# Altium schematic symbol library Module.SchLib: 29 symbols
Pins are listed as number, name and electrical type; pins without a type are passive.

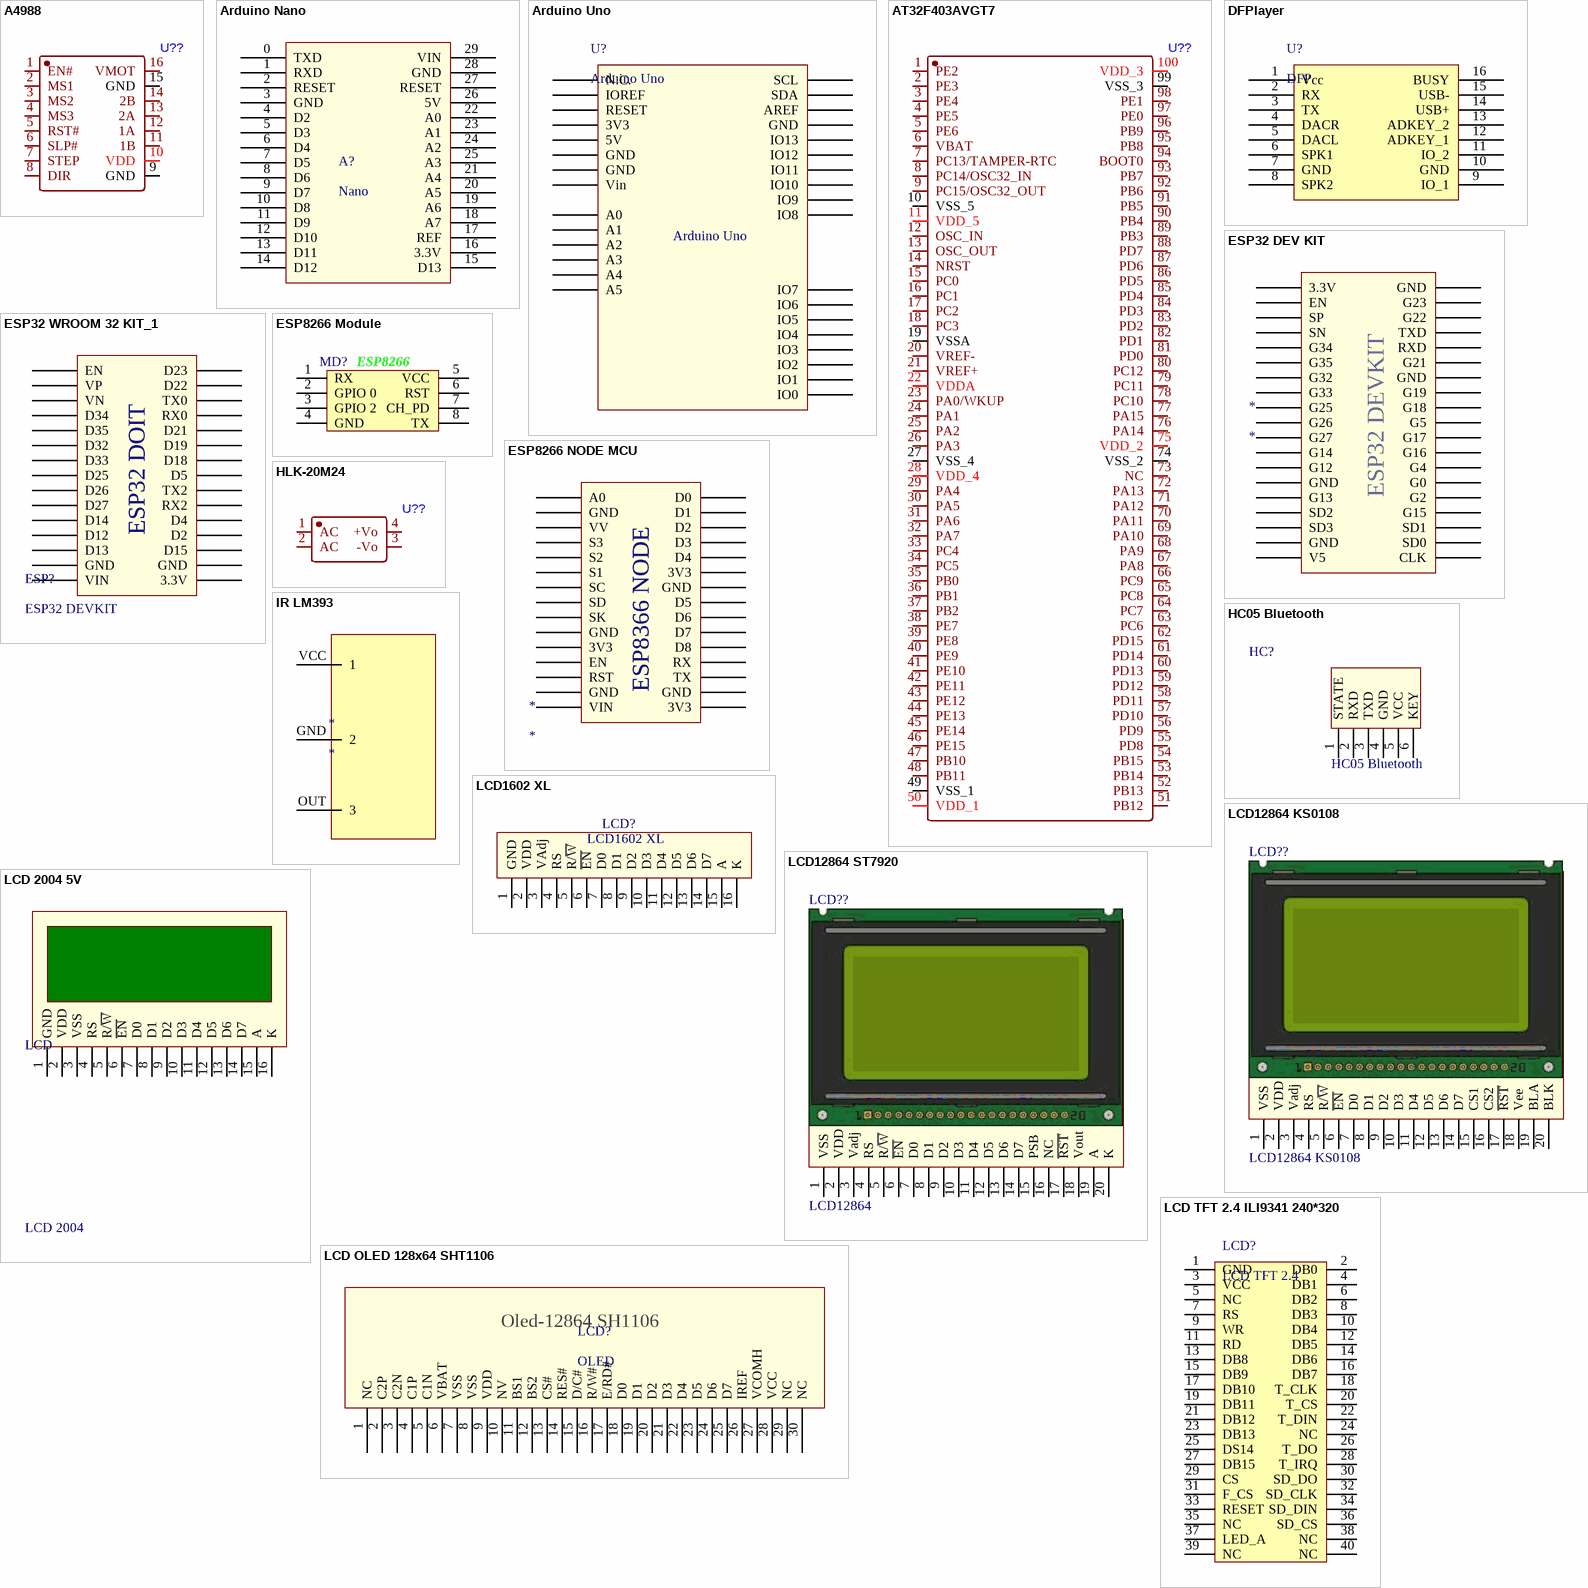
[diagram p0: symbols A4988 to LCD TFT 2.4 ILI9341 240*320]

## A4988
designator U??
Designer: Kata; Datasheet: https://www.alldatasheet.com/datasheet-pdf/pdf/455036/ALLEGRO/A4988.html; Link origin: https://grabcad.com/library/a4988-stepper-driver-with-pins-socketed-1, https://easyeda.com/editor#id=!b21f460f337c435d854d954092ca6a03|!253cdfaaa9784aa9ac4f75afb905f3ce; Link Vietnam: https://linhkienchatluong.vn/urlmodule-dieu-khien-dong-co/module-dieu-khien-dong-co-buoc-a4988_sp496_ct6114.aspx
footprint A4988
pins: 1 EN#, 2 MS1, 3 MS2, 4 MS3, 5 RST#, 6 SLP#, 7 STEP, 8 DIR, 9 GND, 10 VDD, 11 1B, 12 1A, 13 2A, 14 2B, 15 GND, 16 VMOT

## Arduino Nano
designator A?, comment Nano
footprint Arduino nano (arduino nano)
pins: 0 TXD, 1 RXD, 2 RESET, 3 GND, 4 D2, 5 D3, 6 D4, 7 D5, 8 D6, 9 D7, 10 D8, 11 D9, 12 D10, 13 D11, 14 D12, 15 D13, 16 3.3V, 17 REF, 18 A7, 19 A6, 20 A5, 21 A4, 22 A0, 23 A1, 24 A2, 25 A3, 26 5V, 27 RESET, 28 GND, 29 VIN

## Arduino Uno
designator U?
footprint Arduino Uno
footprint Arduino Uno Shield
pins: 0 IO0, 1 IO1, 2 IO2, 3 IO3, 3V3, 4 IO4, 5 IO5, 5V, 6 IO6, 7 IO7, 8 IO8, 9 IO9, 10 IO10, 11 IO11, 12 IO12, 13 IO13, A0, A1, A2, A3, A4, A5, AREF, GND1 GND, GND2 GND, GND3 GND, IOREF, NC N.C., RESET, SCL, SDA, Vin

## AT32F403AVGT7
designator U??
ARM Cortex-M4F 32 Bit 240MHz LQFP-100(14x14) Microcontrollers; Designer: Kata; Link origin: https://www.lcsc.com/product-detail/C528442.html?globalKeyword=C528442&s_z=n_q_C528442; Link origin2: https://componentsearchengine.com/part-view/STM32F103VGT6/STMicroelectronics; Link Datasheet: https://www.lcsc.com/datasheet/C528442.pdf
footprint AT32F403AVGT7
pins: 1 PE2, 2 PE3, 3 PE4, 4 PE5, 5 PE6, 6 VBAT, 7 PC13/TAMPER-RTC, 8 PC14/OSC32_IN, 9 PC15/OSC32_OUT, 10 VSS_5, 11 VDD_5, 12 OSC_IN, 13 OSC_OUT, 14 NRST, 15 PC0, 16 PC1, 17 PC2, 18 PC3, 19 VSSA, 20 VREF-, 21 VREF+, 22 VDDA, 23 PA0/WKUP, 24 PA1, 25 PA2, 26 PA3, 27 VSS_4, 28 VDD_4, 29 PA4, 30 PA5, 31 PA6, 32 PA7, 33 PC4, 34 PC5, 35 PB0, 36 PB1, 37 PB2, 38 PE7, 39 PE8, 40 PE9, 41 PE10, 42 PE11, 43 PE12, 44 PE13, 45 PE14, 46 PE15, 47 PB10, 48 PB11, 49 VSS_1, 50 VDD_1, 51 PB12, 52 PB13, 53 PB14, 54 PB15, 55 PD8, 56 PD9, 57 PD10, 58 PD11, 59 PD12, 60 PD13, 61 PD14, 62 PD15, 63 PC6, 64 PC7, 65 PC8, 66 PC9, 67 PA8, 68 PA9, 69 PA10, 70 PA11, 71 PA12, 72 PA13, 73 NC, 74 VSS_2, 75 VDD_2, 76 PA14, 77 PA15, 78 PC10, 79 PC11, 80 PC12, 81 PD0, 82 PD1, 83 PD2, 84 PD3, 85 PD4, 86 PD5, 87 PD6, 88 PD7, 89 PB3, 90 PB4, 91 PB5, 92 PB6, 93 PB7, 94 BOOT0, 95 PB8, 96 PB9, 97 PE0, 98 PE1, 99 VSS_3, 100 VDD_3

## DFPlayer
designator U?, comment DFP
DFPlayer
footprint DFPlayer
pins: 1 Vcc, 2 RX, 3 TX, 4 DACR, 5 DACL, 6 SPK1, 7 GND, 8 SPK2, 9 IO_1, 10 GND, 11 IO_2, 12 ADKEY_1, 13 ADKEY_2, 14 USB+, 15 USB-, 16 BUSY

## ESP32 DEV KIT
designator *
footprint ESP32 DEVKIT
pins: 1 3.3V, 2 EN, 3 SP, 4 SN, 5 G34, 6 G35, 7 G32, 8 G33, 9 G25, 10 G26, 11 G27, 12 G14, 13 G12, 14 GND, 15 G13, 16 SD2, 17 SD3, 18 GND, 19 V5, 20 CLK, 21 SD0, 22 SD1, 23 G15, 24 G2, 25 G0, 26 G4, 27 G16, 28 G17, 29 G5, 30 G18, 31 G19, 32 GND, 33 G21, 34 RXD, 35 TXD, 36 G22, 37 G23, 38 GND
text: ESP32 DEVKIT

## ESP32 WROOM 32 KIT_1
designator ESP?, comment ESP32 DEVKIT
Bảng Mạch Phát Triển WiFi Bluetooth Esp32; Designer: Kata; Datasheet: https://documentation.espressif.com/esp32-wroom-32_datasheet_en.pdf; Link Vietnam: https://shopee.vn/product/578443443/13742226706?d_id=3c2cb&uls_trackid=56tnvmar01un&utm_content=dRt74n3cjNaVUMxz7zAFb97c8p7
footprint ESP32 WROOM 32 KIT
pins: 1 EN, 2 VP, 3 VN, 4 D34, 5 D35, 6 D32, 7 D33, 8 D25, 9 D26, 10 D27, 11 D14, 12 D12, 13 D13, 14 GND, 15 VIN, 16 3.3V, 17 GND, 18 D15, 19 D2, 20 D4, 21 RX2, 22 TX2, 23 D5, 24 D18, 25 D19, 26 D21, 27 RX0, 28 TX0, 29 D22, 30 D23
text: ESP32 DOIT

## ESP8266 Module
designator MD?  (value not drawn)
footprint ESP2866 Module
pins: 1 RX, 2 GPIO 0, 3 GPIO 2, 4 GND, 5 VCC, 6 RST, 7 CH_PD, 8 TX
text: ESP8266

## ESP8266 NODE MCU
designator *
footprint ESP8266 NODE MCU
pins: 1 A0, 2 GND, 3 VV, 4 S3, 5 S2, 6 S1, 7 SC, 8 SD, 9 SK, 10 GND, 11 3V3, 12 EN, 13 RST, 14 GND, 15 VIN, 16 3V3, 17 GND, 18 TX, 19 RX, 20 D8, 21 D7, 22 D6, 23 D5, 24 GND, 25 3V3, 26 D4, 27 D3, 28 D2, 29 D1, 30 D0
text: ESP8366 NODE

## HC05 Bluetooth
designator HC?
Bluetooth HC05; Value: Connector 6
footprint HC05 Bluethooth Dung (Connector; Header; 6 Position)
footprint HC05 Bluethooth Nam (Connector; Header; 6 Position)
pins: 1 STATE, 2 RXD, 3 TXD, 4 GND, 5 VCC, 6 KEY

## HLK-20M24
designator U??
Designer: Kata; Link Origin: https://grabcad.com/library/hlk-20m05-power-supply-1; Link: https://hlktech.net/index.php?id=product&cate=ACDC20W; Parameter 4: *
footprint HLK-20MXX
pins: 1 AC, 2 AC, 3 -Vo, 4 +Vo

## IR LM393
designator *
Designer: Kata; Datasheet: https://www.onsemi.com/download/data-sheet/pdf/lm393-d.pdf; Link Vietnam: https://hshop.vn/cam-bien-vat-can-hong-ngoai-v1-2
footprint IR LM393
pins: GND 2, OUT 3, VCC 1

## LCD1602 XL
designator LCD?
LCD 1602 Xanh Lá; Ten: Màn hình LCD 1602 Xanh Lá; Ma_Hang: 67HZ; NCC: NSHOP; CHIP: HD44780
footprint LCD1602 with Jump (LCD dipslay 16x2, 16 pin)
footprint LCD1602 (LCD dipslay 16x2, 16 pin)
pins: 1 GND, 2 VDD, 3 VAdj, 4 RS, 5 R/~{W}, 6 ~{EN}, 7 D0, 8 D1, 9 D2, 10 D3, 11 D4, 12 D5, 13 D6, 14 D7, 15 A, 16 K

## LCD12864 KS0108
designator LCD??
LCD Graphic 128x64 KS0108; Value: LCD 128x64
footprint LCD128x64 (LCD Graphic 128x64, 20 pin)
pins: 1 VSS, 2 VDD, 3 Vadj, 4 RS, 5 R/~{W}, 6 ~{EN}, 7 D0, 8 D1, 9 D2, 10 D3, 11 D4, 12 D5, 13 D6, 14 D7, 15 CS1, 16 CS2, 17 ~{RST}, 18 Vee, 19 BLA, 20 BLK

## LCD12864 ST7920
designator LCD??, comment LCD12864
LCD Graphic 128x64 ST7920; Value: LCD 128x64
footprint LCD128x64 (LCD Graphic 128x64, 20 pin)
pins: 1 VSS, 2 VDD, 3 Vadj, 4 RS, 5 R/~{W}, 6 ~{EN}, 7 D0, 8 D1, 9 D2, 10 D3, 11 D4, 12 D5, 13 D6, 14 D7, 15 PSB, 16 NC, 17 ~{RST}, 18 Vout, 19 A, 20 K

## LCD 2004 5V
designator LCD, comment LCD 2004
LCD 2004 5V Xanh Dương; Ten: LCD 2004 Xanh Dương; Ma_Hang: WVEZ; CHIP: HD44780; Don Vi Mua: Nshop
footprint LCD 2004 (LCD dipslay 20x4, 16 pin)
pins: 1 GND, 2 VDD, 3 VSS, 4 RS, 5 R/~{W}, 6 ~{EN}, 7 D0, 8 D1, 9 D2, 10 D3, 11 D4, 12 D5, 13 D6, 14 D7, 15 A, 16 K

## LCD OLED 128x64 SHT1106
designator LCD?, comment OLED
LCD OLED 128x64 SHT1106 only sceen
footprint LCD OLED 128x64 SHT1106
pins: 1 NC, 2 C2P, 3 C2N, 4 C1P, 5 C1N, 6 VBAT, 7 VSS, 8 VSS, 9 VDD, 10 NV, 11 BS1, 12 BS2, 13 CS#, 14 RES#, 15 D/C#, 16 R/W#, 17 E/RD#, 18 D0, 19 D1, 20 D2, 21 D3, 22 D4, 23 D5, 24 D6, 25 D7, 26 IREF, 27 VCOMH, 28 VCC, 29 NC, 30 NC
text: Oled-12864 SH1106

## LCD TFT 2.4 ILI9341 240*320
designator LCD?, comment LCD TFT 2.4
ILI9341 Driver
footprint LCD TFT 2.4 240*320 (Connector; Header; 20x2 Position)
pins: 1 GND, 2 DB0, 3 VCC, 4 DB1, 5 NC, 6 DB2, 7 RS, 8 DB3, 9 WR, 10 DB4, 11 RD, 12 DB5, 13 DB8, 14 DB6, 15 DB9, 16 DB7, 17 DB10, 18 T_CLK, 19 DB11, 20 T_CS, 21 DB12, 22 T_DIN, 23 DB13, 24 NC, 25 DS14, 26 T_DO, 27 DB15, 28 T_IRQ, 29 CS, 30 SD_DO, 31 F_CS, 32 SD_CLK, 33 RESET, 34 SD_DIN, 35 NC, 36 SD_CS, 37 LED_A, 38 NC, 39 NC, 40 NC

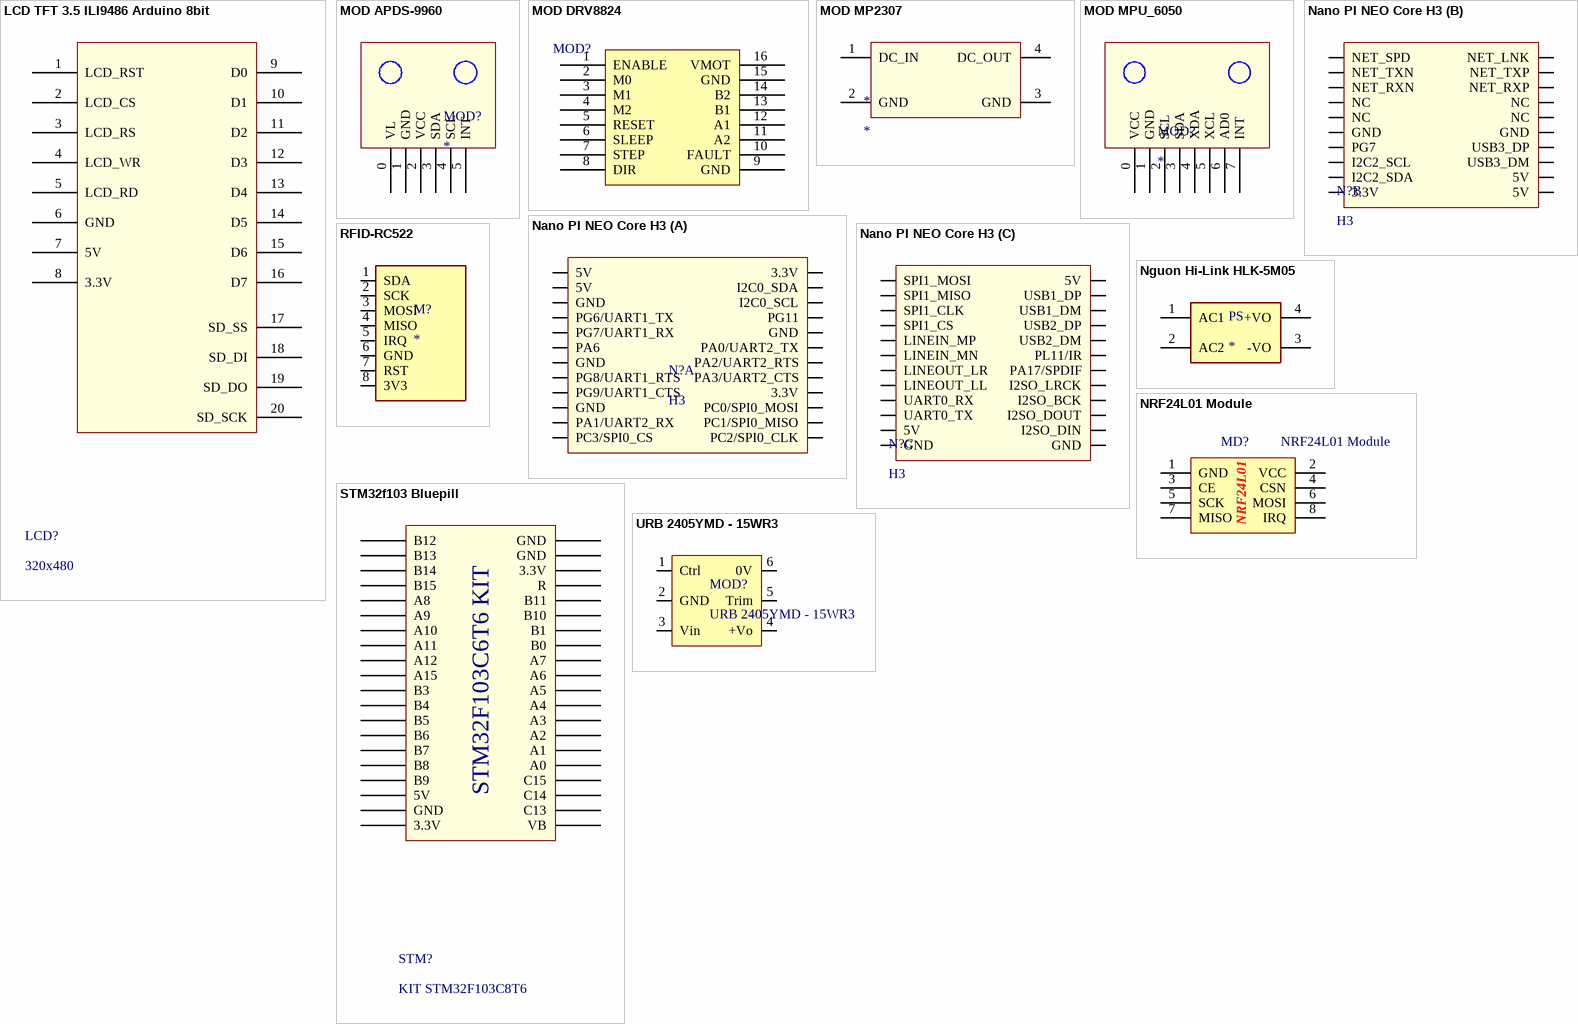
[diagram p1: symbols LCD TFT 3.5 ILI9486 Arduino 8bit to URB 2405YMD - 15WR3]

## LCD TFT 3.5 ILI9486 Arduino 8bit
designator LCD?, comment 320x480
footprint LCD TFT 3.5 8bit Arduino
pins: 1 LCD_RST, 2 LCD_CS, 3 LCD_RS, 4 LCD_WR, 5 LCD_RD, 6 GND, 7 5V, 8 3.3V, 9 D0, 10 D1, 11 D2, 12 D3, 13 D4, 14 D5, 15 D6, 16 D7, 17 SD_SS, 18 SD_DI, 19 SD_DO, 20 SD_SCK

## MOD APDS-9960
designator MOD?
footprint MOD APDS-9960
pins: 0 VL, 1 GND, 2 VCC, 3 SDA, 4 SCL, 5 INT

## MOD DRV8824
designator MOD?
Control step motor
footprint MOD DRV 8825
pins: 1 ENABLE, 2 M0, 3 M1, 4 M2, 5 RESET, 6 SLEEP, 7 STEP, 8 DIR, 9 GND, 10 FAULT, 11 A2, 12 A1, 13 B1, 14 B2, 15 GND, 16 VMOT

## MOD MP2307
designator *
footprint MOD MP2307
pins: 1 DC_IN, 2 GND, 3 GND, 4 DC_OUT

## MOD MPU_6050
designator MOD?
footprint MOD MPU-6050
pins: 0 VCC, 1 GND, 2 SCL, 3 SDA, 4 XDA, 5 XCL, 6 AD0, 7 INT

## Nano PI NEO Core H3
designator N?, comment H3
Nano PI NEO Core Allwinner H3
footprint Nano PI NEO Core H3
part A pins: 1 5V, 2 5V, 3 GND, 4 PG6/UART1_TX, 5 PG7/UART1_RX, 6 PA6, 7 GND, 8 PG8/UART1_RTS, 9 PG9/UART1_CTS, 10 GND, 11 PA1/UART2_RX, 12 PC3/SPI0_CS, 13 PC2/SPI0_CLK, 14 PC1/SPI0_MISO, 15 PC0/SPI0_MOSI, 16 3.3V, 17 PA3/UART2_CTS, 18 PA2/UART2_RTS, 19 PA0/UART2_TX, 20 GND, 21 PG11, 22 I2C0_SCL, 23 I2C0_SDA, 24 3.3V
part B pins: 25 NET_SPD, 26 NET_TXN, 27 NET_RXN, 28 NC, 29 NC, 30 GND, 31 PG7, 32 I2C2_SCL, 33 I2C2_SDA, 34 3.3V, 35 5V, 36 5V, 37 USB3_DM, 38 USB3_DP, 39 GND, 40 NC, 41 NC, 42 NET_RXP, 43 NET_TXP, 44 NET_LNK
part C pins: 45 SPI1_MOSI, 46 SPI1_MISO, 47 SPI1_CLK, 48 SPI1_CS, 49 LINEIN_MP, 50 LINEIN_MN, 51 LINEOUT_LR, 52 LINEOUT_LL, 53 UART0_RX, 54 UART0_TX, 55 5V, 56 GND, 57 GND, 58 I2SO_DIN, 59 I2SO_DOUT, 60 I2SO_BCK, 61 I2SO_LRCK, 62 PA17/SPDIF, 63 PL11/IR, 64 USB2_DM, 65 USB2_DP, 66 USB1_DM, 67 USB1_DP, 68 5V

## Nguon Hi-Link HLK-5M05
designator PS
AC DC 220V to 5V 5W 5Watt Isolated Switching Step-Down Power Supply Module Converter; MF: Hi-link; MP: HLK-5M05; Availability: Unavailable; SnapEDA_Link: https://www.snapeda.com/parts/HLK-5M05/Hi-link/view-part/2758659/?ref=snap; Price: None; Package: Package Analog Devices; Value: *
footprint Nguon HI-LINK 5M05
pins: 1 AC1, 2 AC2, 3 -VO, 4 +VO

## NRF24L01 Module
designator MD?
footprint NRF24L01
pins: 1 GND, 2 VCC, 3 CE, 4 CSN, 5 SCK, 6 MOSI, 7 MISO, 8 IRQ
text: NRF24L01

## RFID-RC522
designator M?
Development kit in an integrated reader/writer IC MFRC522 for contactless communication at 13.56 MHz.; MF: Handson Technology; MP: RFID-RC522; Designer: Kata; SnapEDA_Link: https://www.snapeda.com/parts/RFID-RC522/Handson+Technology/view-part/?ref=snap; Package: Package; Value: *; Check_prices: https://www.snapeda.com/parts/RFID-RC522/Handson+Technology/view-part/?ref=eda; Link Vietnam: https://linhkienchatluong.vn/urlmodule-rfrfid/module-rfid-rc522-nfc-1356mhz_sp491_ct192.aspx
footprint RFID-RC522
pins: 1 SDA, 2 SCK, 3 MOSI, 4 MISO, 5 IRQ, 6 GND, 7 RST, 8 3V3

## STM32f103 Bluepill
designator STM?, comment KIT STM32F103C8T6
KIT STM32F103C8T6 Bluepill
footprint STM32F103 KIT
pins: 1 B12, 2 B13, 3 B14, 4 B15, 5 A8, 6 A9, 7 A10, 8 A11, 9 A12, 10 A15, 11 B3, 12 B4, 13 B5, 14 B6, 15 B7, 16 B8, 17 B9, 18 5V, 19 GND, 20 3.3V, 21 VB, 22 C13, 23 C14, 24 C15, 25 A0, 26 A1, 27 A2, 28 A3, 29 A4, 30 A5, 31 A6, 32 A7, 33 B0, 34 B1, 35 B10, 36 B11, 37 R, 38 3.3V, 39 GND, 40 GND
text: STM32F103C6T6 KIT

## URB 2405YMD - 15WR3
designator MOD?
Isolated Module DC DC Converter 1 Output 5V 3A 9V - 36V Input
footprint URB_YMD-15WR3 (Isolated Module DC DC Converter 1 Output 5V 3A 9V - 36V Input)
pins: 1 Ctrl, 2 GND, 3 Vin, 4 +Vo, 5 Trim, 6 0V